# Altium footprint library FootPrintLib_8.PcbLib: 590 footprints (part 28 of 37)
Each footprint in its own frame and in the unit in brackets; x right, y up, seen from the top. Pads: shape width x height; smd on the part's side, far side on the other; paste and mask are expansions set on the pad; w line width, h text height; cw(c..) or ccw(c..) is an arc to the next point about the centre after c.
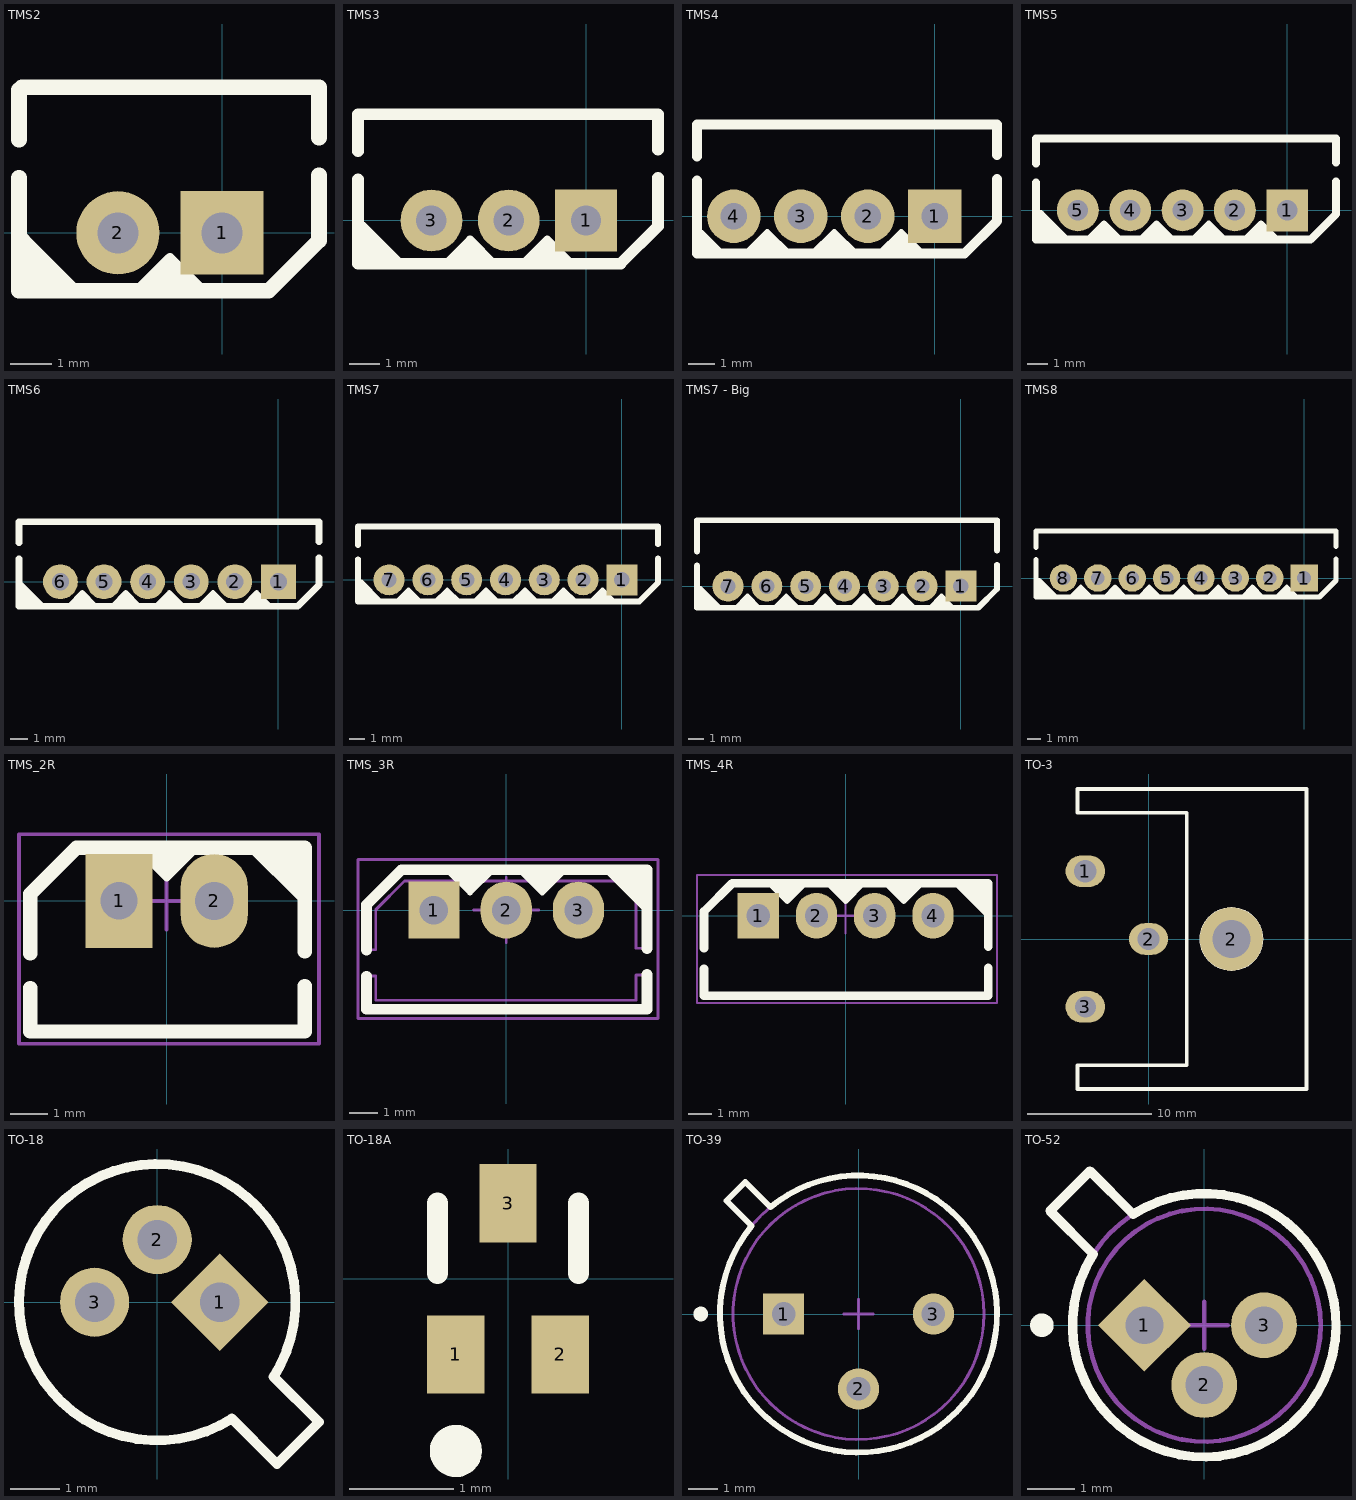
[diagram p27: the footprints below, top view; thin cyan lines are the x and y axes]

## TMS2 [mil]
pads (2):
  rect 80x80 hole 39.37: 1(0,0)
  round 80 hole 39.37: 2(-100,0)
Top Overlay:
  lines w10: -195,137.2 -192.2,140 ; -81.5,-55.71 -50,-24.21 ; -70.71,-55.71 -50,-35 -29.29,-55.71 ; -60.71,-55.71 -50,-45 -39.29,-55.71 ; -50,-55.71 -50,-24.21 ; -18.5,-55.71 -50,-24.21
  lines w15: -195,53.11 -195,-55.71 44.69,-55.71 93.11,-7.28 93.11,55.31 ; -195,89.33 -195,137.2 ; -192.2,140 93.11,140 93.11,91.54 ; -191.54,-7.28 -143.11,-55.71 ; -181.54,-55.71 -191.54,-45.71 -191.54,-35.71 -171.54,-55.71 -161.54,-55.71 -191.54,-25.71 -191.54,-15.71 -151.54,-55.71

## TMS3 [mil]
pads (3):
  rect 80x80 hole 39.37: 1(0,0)
  round 80 hole 39.37: 2(-100,0) 3(-200,0)
Top Overlay:
  lines w10: -181.5,-55.71 -150,-24.21 ; -170.71,-55.71 -150,-35 -129.29,-55.71 ; -160.71,-55.71 -150,-45 -139.29,-55.71 ; -150,-55.71 -150,-24.21 ; -118.5,-55.71 -150,-24.21 ; -81.5,-55.71 -50,-24.21 ; -70.71,-55.71 -50,-35 -29.29,-55.71 ; -60.71,-55.71 -50,-45 -39.29,-55.71 ; -50,-55.71 -50,-24.21 ; -18.5,-55.71 -50,-24.21
  lines w15: -295,53.11 -295,-55.71 44.69,-55.71 93.11,-7.28 93.11,55.31 ; -295,89.33 -295,137.2 93.11,137.2 93.11,91.54 ; -291.54,-7.28 -243.11,-55.71 ; -281.54,-55.71 -291.54,-45.71 -291.54,-35.71 -271.54,-55.71 -261.54,-55.71 -291.54,-25.71 -291.54,-15.71 -251.54,-55.71

## TMS4 [mil]
pads (4):
  rect 80x80 hole 39.37: 1(0,0)
  round 80 hole 39.37: 2(-100,0) 3(-200,0) 4(-300,0)
Top Overlay:
  lines w10: -350,-55.71 -350,-24.21 -318.5,-55.71 ; -350,-45 -339.29,-55.71 ; -350,-35 -329.29,-55.71 ; -281.5,-55.71 -250,-24.21 ; -270.71,-55.71 -250,-35 -229.29,-55.71 ; -260.71,-55.71 -250,-45 -239.29,-55.71 ; -250,-55.71 -250,-24.21 ; -218.5,-55.71 -250,-24.21 ; -181.5,-55.71 -150,-24.21 ; -170.71,-55.71 -150,-35 -129.29,-55.71 ; -160.71,-55.71 -150,-45 -139.29,-55.71 ; -150,-55.71 -150,-24.21 ; -118.5,-55.71 -150,-24.21 ; -81.5,-55.71 -50,-24.21 ; -70.71,-55.71 -50,-35 -29.29,-55.71 ; -60.71,-55.71 -50,-45 -39.29,-55.71 ; -50,-55.71 -50,-24.21 ; -18.5,-55.71 -50,-24.21
  lines w15: -355,53.11 -355,-55.71 44.69,-55.71 93.11,-7.28 93.11,55.31 ; -355,89.33 -355,137.2 93.11,137.2 93.11,91.54

## TMS5 [mil]
pads (5):
  rect 80x80 hole 39.37: 1(0,0)
  round 80 hole 39.37: 2(-100,0) 3(-200,0) 4(-300,0) 5(-400,0)
Top Overlay:
  lines w10: -470.71,-45 -460,-55.71 -469.29,-55.71 ; -456.63,-53.37 -452.66,-53.37 -455,-55.71 -440,-55.71 ; -381.5,-55.71 -350,-24.21 ; -370.71,-55.71 -350,-35 -329.29,-55.71 ; -360.71,-55.71 -350,-45 -339.29,-55.71 ; -350,-55.71 -350,-24.21 ; -318.5,-55.71 -350,-24.21 ; -281.5,-55.71 -250,-24.21 ; -270.71,-55.71 -250,-35 -229.29,-55.71 ; -260.71,-55.71 -250,-45 -239.29,-55.71 ; -250,-55.71 -250,-24.21 ; -218.5,-55.71 -250,-24.21 ; -181.5,-55.71 -150,-24.21 ; -170.71,-55.71 -150,-35 -129.29,-55.71 ; -160.71,-55.71 -150,-45 -139.29,-55.71 ; -150,-55.71 -150,-24.21 ; -118.5,-55.71 -150,-24.21 ; -81.5,-55.71 -50,-24.21 ; -70.71,-55.71 -50,-35 -29.29,-55.71 ; -60.71,-55.71 -50,-45 -39.29,-55.71 ; -50,-55.71 -50,-24.21 ; -18.5,-55.71 -50,-24.21
  lines w15: -480,53.11 -480,-55.71 44.69,-55.71 93.11,-7.28 93.11,55.31 ; -480,89.33 -480,137.2 93.11,137.2 93.11,91.54 ; -471.54,-7.28 -423.11,-55.71 ; -461.54,-55.71 -471.54,-45.71 -471.54,-35.71 -451.54,-55.71 -441.54,-55.71 -471.54,-25.71 -471.54,-15.71 -431.54,-55.71

## TMS6 [mil]
pads (6):
  rect 80x80 hole 39.37: 1(0,0)
  round 80 hole 39.37: 2(-100,0) 3(-200,0) 4(-300,0) 5(-400,0) 6(-500,0)
Top Overlay:
  lines w10: -481.5,-55.71 -450,-24.21 ; -470.71,-55.71 -450,-35 -429.29,-55.71 ; -460.71,-55.71 -450,-45 -439.29,-55.71 ; -450,-55.71 -450,-24.21 ; -418.5,-55.71 -450,-24.21 ; -381.5,-55.71 -350,-24.21 ; -370.71,-55.71 -350,-35 -329.29,-55.71 ; -360.71,-55.71 -350,-45 -339.29,-55.71 ; -350,-55.71 -350,-24.21 ; -318.5,-55.71 -350,-24.21 ; -281.5,-55.71 -250,-24.21 ; -270.71,-55.71 -250,-35 -229.29,-55.71 ; -260.71,-55.71 -250,-45 -239.29,-55.71 ; -250,-55.71 -250,-24.21 ; -218.5,-55.71 -250,-24.21 ; -181.5,-55.71 -150,-24.21 ; -170.71,-55.71 -150,-35 -129.29,-55.71 ; -160.71,-55.71 -150,-45 -139.29,-55.71 ; -150,-55.71 -150,-24.21 ; -118.5,-55.71 -150,-24.21 ; -81.5,-55.71 -50,-24.21 ; -70.71,-55.71 -50,-35 -29.29,-55.71 ; -60.71,-55.71 -50,-45 -39.29,-55.71 ; -50,-55.71 -50,-24.21 ; -18.5,-55.71 -50,-24.21
  lines w15: -595,53.11 -595,-55.71 44.69,-55.71 93.11,-7.28 93.11,55.31 ; -595,89.33 -595,137.2 93.11,137.2 93.11,91.54 ; -591.54,-7.28 -543.11,-55.71 ; -581.54,-55.71 -591.54,-45.71 -591.54,-35.71 -571.54,-55.71 -561.54,-55.71 -591.54,-25.71 -591.54,-15.71 -551.54,-55.71

## TMS7 [mil]
pads (7):
  rect 80x80 hole 39.37: 1(0,0)
  round 80 hole 39.37: 2(-100,0) 3(-200,0) 4(-300,0) 5(-400,0) 6(-500,0) 7(-600,0)
Top Overlay:
  lines w10: -581.5,-55.71 -550,-24.21 ; -570.71,-55.71 -550,-35 -529.29,-55.71 ; -560.71,-55.71 -550,-45 -539.29,-55.71 ; -550,-55.71 -550,-24.21 ; -518.5,-55.71 -550,-24.21 ; -481.5,-55.71 -450,-24.21 ; -470.71,-55.71 -450,-35 -429.29,-55.71 ; -460.71,-55.71 -450,-45 -439.29,-55.71 ; -450,-55.71 -450,-24.21 ; -418.5,-55.71 -450,-24.21 ; -381.5,-55.71 -350,-24.21 ; -370.71,-55.71 -350,-35 -329.29,-55.71 ; -360.71,-55.71 -350,-45 -339.29,-55.71 ; -350,-55.71 -350,-24.21 ; -318.5,-55.71 -350,-24.21 ; -281.5,-55.71 -250,-24.21 ; -270.71,-55.71 -250,-35 -229.29,-55.71 ; -260.71,-55.71 -250,-45 -239.29,-55.71 ; -250,-55.71 -250,-24.21 ; -218.5,-55.71 -250,-24.21 ; -181.5,-55.71 -150,-24.21 ; -170.71,-55.71 -150,-35 -129.29,-55.71 ; -160.71,-55.71 -150,-45 -139.29,-55.71 ; -150,-55.71 -150,-24.21 ; -118.5,-55.71 -150,-24.21 ; -81.5,-55.71 -50,-24.21 ; -70.71,-55.71 -50,-35 -29.29,-55.71 ; -60.71,-55.71 -50,-45 -39.29,-55.71 ; -50,-55.71 -50,-24.21 ; -18.5,-55.71 -50,-24.21
  lines w15: -680,53.11 -680,-55.71 44.69,-55.71 93.11,-7.28 93.11,55.31 ; -680,89.33 -680,137.2 93.11,137.2 93.11,91.54 ; -671.54,-7.28 -623.11,-55.71 ; -661.54,-55.71 -671.54,-45.71 -671.54,-35.71 -651.54,-55.71 -641.54,-55.71 -671.54,-25.71 -671.54,-15.71 -631.54,-55.71

## TMS7 - Big [mil] "p?"
pads (7):
  rect 80x80 hole 39.37: 1(0,0)
  round 80 hole 39.37: 2(-100,0) 3(-200,0) 4(-300,0) 5(-400,0) 6(-500,0) 7(-600,0)
Top Overlay:
  lines w10: -581.5,-55.71 -550,-24.21 ; -570.71,-55.71 -550,-35 -529.29,-55.71 ; -560.71,-55.71 -550,-45 -539.29,-55.71 ; -550,-55.71 -550,-24.21 ; -518.5,-55.71 -550,-24.21 ; -481.5,-55.71 -450,-24.21 ; -470.71,-55.71 -450,-35 -429.29,-55.71 ; -460.71,-55.71 -450,-45 -439.29,-55.71 ; -450,-55.71 -450,-24.21 ; -418.5,-55.71 -450,-24.21 ; -381.5,-55.71 -350,-24.21 ; -370.71,-55.71 -350,-35 -329.29,-55.71 ; -360.71,-55.71 -350,-45 -339.29,-55.71 ; -350,-55.71 -350,-24.21 ; -318.5,-55.71 -350,-24.21 ; -281.5,-55.71 -250,-24.21 ; -270.71,-55.71 -250,-35 -229.29,-55.71 ; -260.71,-55.71 -250,-45 -239.29,-55.71 ; -250,-55.71 -250,-24.21 ; -218.5,-55.71 -250,-24.21 ; -181.5,-55.71 -150,-24.21 ; -170.71,-55.71 -150,-35 -129.29,-55.71 ; -160.71,-55.71 -150,-45 -139.29,-55.71 ; -150,-55.71 -150,-24.21 ; -118.5,-55.71 -150,-24.21 ; -81.5,-55.71 -50,-24.21 ; -70.71,-55.71 -50,-35 -29.29,-55.71 ; -60.71,-55.71 -50,-45 -39.29,-55.71 ; -50,-55.71 -50,-24.21 ; -18.5,-55.71 -50,-24.21
  lines w15: -680,53.11 -680,-55.71 44.69,-55.71 93.11,-7.28 93.11,55.31 ; -680,89.33 -680,170 93.11,170 93.11,91.54 ; -671.54,-7.28 -623.11,-55.71 ; -661.54,-55.71 -671.54,-45.71 -671.54,-35.71 -651.54,-55.71 -641.54,-55.71 -671.54,-25.71 -671.54,-15.71 -631.54,-55.71

## TMS8 [mil]
pads (8):
  rect 80x80 hole 39.37: 1(0,0)
  round 80 hole 39.37: 2(-100,0) 3(-200,0) 4(-300,0) 5(-400,0) 6(-500,0) 7(-600,0) 8(-700,0)
Top Overlay:
  lines w10: -681.5,-55.71 -650,-24.21 ; -670.71,-55.71 -650,-35 -629.29,-55.71 ; -660.71,-55.71 -650,-45 -639.29,-55.71 ; -650,-55.71 -650,-24.21 ; -618.5,-55.71 -650,-24.21 ; -581.5,-55.71 -550,-24.21 ; -570.71,-55.71 -550,-35 -529.29,-55.71 ; -560.71,-55.71 -550,-45 -539.29,-55.71 ; -550,-55.71 -550,-24.21 ; -518.5,-55.71 -550,-24.21 ; -481.5,-55.71 -450,-24.21 ; -470.71,-55.71 -450,-35 -429.29,-55.71 ; -460.71,-55.71 -450,-45 -439.29,-55.71 ; -450,-55.71 -450,-24.21 ; -418.5,-55.71 -450,-24.21 ; -381.5,-55.71 -350,-24.21 ; -370.71,-55.71 -350,-35 -329.29,-55.71 ; -360.71,-55.71 -350,-45 -339.29,-55.71 ; -350,-55.71 -350,-24.21 ; -318.5,-55.71 -350,-24.21 ; -281.5,-55.71 -250,-24.21 ; -270.71,-55.71 -250,-35 -229.29,-55.71 ; -260.71,-55.71 -250,-45 -239.29,-55.71 ; -250,-55.71 -250,-24.21 ; -218.5,-55.71 -250,-24.21 ; -181.5,-55.71 -150,-24.21 ; -170.71,-55.71 -150,-35 -129.29,-55.71 ; -160.71,-55.71 -150,-45 -139.29,-55.71 ; -150,-55.71 -150,-24.21 ; -118.5,-55.71 -150,-24.21 ; -81.5,-55.71 -50,-24.21 ; -70.71,-55.71 -50,-35 -29.29,-55.71 ; -60.71,-55.71 -50,-45 -39.29,-55.71 ; -50,-55.71 -50,-24.21 ; -18.5,-55.71 -50,-24.21
  lines w15: -780,53.11 -780,-55.71 44.69,-55.71 93.11,-7.28 93.11,55.31 ; -780,89.33 -780,137.2 93.11,137.2 93.11,91.54 ; -771.54,-7.28 -723.11,-55.71 ; -761.54,-55.71 -771.54,-45.71 -771.54,-35.71 -751.54,-55.71 -741.54,-55.71 -771.54,-25.71 -771.54,-15.71 -731.54,-55.71

## TMS_2R [mm] "Connector; TMS Sereis; 2 Position ,2.54mm Pitch"
height 5.9
pads (2):
  rect 1.8x2.5 hole 1: 1(-1.27,0)
  oval 1.8x2.5 hole 1.016: 2(1.27,0)
Top Overlay:
  lines w0.203: -0.8,1.415 0,0.615 ; -0.526,1.415 0,0.889 0.526,1.415 ; -0.272,1.415 0,1.143 0.272,1.415 ; 0,1.415 0,0.615 ; 0.8,1.415 0,0.615
  lines w0.381: -3.635,-2.325 -3.635,-3.485 3.683,-3.485 3.683,-2.269 ; -3.635,-1.405 -3.635,0.185 -2.405,1.415 3.683,1.415 3.683,-1.349 ; 2.365,1.415 3.595,0.185 ; 2.579,1.415 3.595,0.399 3.595,0.653 2.833,1.415 3.087,1.415 3.595,0.907 3.595,1.161 3.341,1.415
Mechanical 15:
  lines w0.1: -0.762,0 0,0 ; 0,-0.762 0,0 ; 0,0.762 0,0 ; 0.762,0 0,0 ; -3.937,-3.81 -3.937,1.778 4.064,1.778 4.064,-3.81 -3.937,-3.81
3D body: height 4.5, standoff -2, extent 0.92,-0.35 1.62,0.35
3D body: height 4.5, standoff -2, extent -1.62,-0.35 -0.92,0.35
3D body: height 6, standoff 0, extent -3.85,-3.6 3.9,-2.25
3D body: height 2, standoff 0, extent -3.65,-3.25 3.67,1.3
3D body: height 6, standoff 0, extent -3.85,-1 3.87,1.5

## TMS_3R [mm] "Connector; TMS Sereis; 3 Position ,2.54mm Pitch"
height 5.9
pads (3):
  rect 1.8x2 hole 1: 1(-2.54,0)
  oval 1.8x2 hole 1: 2(0,0) 3(2.54,0)
Top Overlay:
  lines w0.203: -2.07,1.415 -1.27,0.615 ; -1.796,1.415 -1.27,0.889 -0.744,1.415 ; -1.542,1.415 -1.27,1.143 -0.998,1.415 ; -1.27,1.415 -1.27,0.615 ; -0.47,1.415 -1.27,0.615 ; 0.47,1.415 1.27,0.615 ; 0.744,1.415 1.27,0.889 1.796,1.415 ; 0.998,1.415 1.27,1.143 1.542,1.415 ; 1.27,1.415 1.27,0.615 ; 2.07,1.415 1.27,0.615
  lines w0.381: -4.905,-2.325 -4.905,-3.485 4.953,-3.485 4.953,-2.269 ; -4.905,-1.405 -4.905,0.185 -3.675,1.415 4.953,1.415 4.953,-1.349 ; 3.635,1.415 4.865,0.185 ; 3.849,1.415 4.865,0.399 4.865,0.653 4.103,1.415 4.357,1.415 4.865,0.907 4.865,1.161 4.611,1.415
Mechanical 13:
  circle w0.1: c-2.552,0.009 r0.387
  circle w0.1: c-0.012,0.009 r0.387
  circle w0.1: c2.528,0.009 r0.387
  lines w0.1: -4.917,-3.476 -4.917,-2.316 -4.584,-2.316 -4.584,-3.166 4.56,-3.166 4.56,-2.277 4.941,-2.277 4.941,-3.476 -4.917,-3.476 ; -4.917,-1.396 -4.592,-1.396 -4.584,-1.388 -4.584,0.009 -3.568,1.025 -1.683,1.025 -1.282,0.624 -0.881,1.025 0.857,1.025 1.258,0.624 1.659,1.025 4.019,1.025 4.56,0.484 4.56,-1.34 4.941,-1.34 4.941,1.424 -3.687,1.424 -4.917,0.194 -4.917,-1.396
Mechanical 15:
  lines w0.1: -1.143,0 0,0 ; 0,-1.143 0,0 ; 0,1.143 0,0 ; 1.143,0 0,0 ; -5.207,-3.81 -5.207,1.778 5.334,1.778 5.334,-3.81 -5.207,-3.81
3D body: height 5.8, standoff -2, extent -2.946,-0.385 -2.158,0.403
3D body: height 5.8, standoff -2, extent -0.406,-0.385 0.382,0.403
3D body: height 5.8, standoff -2, extent 2.134,-0.385 2.922,0.403
3D body: height 1.8, standoff 0, extent -4.585,-3.166 4.561,1.025
3D body: height 5.9, standoff 0, extent -4.918,-1.397 4.942,1.425
3D body: height 5.9, standoff 0.9, extent -4.916,-3.475 4.94,-2.278

## TMS_4R [mm] "Connector; TMS Sereis; 4 Position ,2.54mm Pitch"
height 5.9
pads (4):
  rect 1.8x2 hole 1.016: 1(-3.81,0)
  oval 1.8x2 hole 1.016: 2(-1.27,0) 3(1.27,0) 4(3.81,0)
Top Overlay:
  lines w0.203: -3.34,1.415 -2.54,0.615 ; -3.066,1.415 -2.54,0.889 -2.014,1.415 ; -2.812,1.415 -2.54,1.143 -2.268,1.415 ; -2.54,1.415 -2.54,0.615 ; -1.74,1.415 -2.54,0.615 ; -0.8,1.415 0,0.615 ; -0.526,1.415 0,0.889 0.526,1.415 ; -0.272,1.415 0,1.143 0.272,1.415 ; 0,1.415 0,0.615 ; 0.8,1.415 0,0.615 ; 1.74,1.415 2.54,0.615 ; 2.014,1.415 2.54,0.889 3.066,1.415 ; 2.268,1.415 2.54,1.143 2.812,1.415 ; 2.54,1.415 2.54,0.615 ; 3.34,1.415 2.54,0.615
  lines w0.381: -6.175,-2.325 -6.175,-3.485 6.223,-3.485 6.223,-2.269 ; -6.175,-1.405 -6.175,0.185 -4.945,1.415 6.223,1.415 6.223,-1.349 ; 4.905,1.415 6.135,0.185 ; 5.119,1.415 6.135,0.399 6.135,0.653 5.373,1.415 5.627,1.415 6.135,0.907 6.135,1.161 5.881,1.415
Mechanical 15:
  lines w0.1: -0.762,0 0,0 ; 0,-0.762 0,0 ; 0,0.762 0,0 ; 0.762,0 0,0 ; -6.477,-3.81 6.604,-3.81 6.604,1.778 -6.477,1.778 -6.477,-3.81
3D body: height 4.5, standoff -2, extent 3.46,-0.35 4.16,0.35
3D body: height 4.5, standoff -2, extent 0.92,-0.35 1.62,0.35
3D body: height 4.5, standoff -2, extent -1.62,-0.35 -0.92,0.35
3D body: height 4.5, standoff -2, extent -4.16,-0.35 -3.46,0.35
3D body: height 6, standoff 0, extent -6.3,-3.6 6.35,-2.25
3D body: height 2, standoff 0, extent -6.1,-3.25 6.2,1.35
3D body: height 6, standoff 0, extent -6.3,-1 6.35,1.5

## TO-3 [mil]
pads (4):
  oval 125x100 hole 70.87: 1(-200,215) 2(0,0)
  round 200 hole 120: 2(262.5,0)
  oval 125x100 hole 66.93: 3(-200,-215)
Top Overlay:
  circle w12: c262.5,0 r95
  lines w12: -225,-475 -225,-400 121,-400 121,400 -225,400 -225,475 500,475 500,-475 -225,-475

## TO-18 [mm] "Can; 3 Leads; Pin Circle Dia. 2.54 mm; Lead Dia. 0.48 mm (max)"
height 2.67
pads (3):
  rect 1.4x1.4 hole 0.8 rot 45: 1(1.27,0)
  round 1.4 hole 0.8: 2(0,1.27) 3(-1.27,0)
Top Overlay:
  lines w0.2: 1.51,-2.358 cw(c0,0) 2.358,-1.51 3.277,-2.429 2.429,-3.277 1.51,-2.358

## TO-18A [mm] "SC-89; 3 Flat Leads; Body 1.6 x 1.6 x 0.7 mm, inc leads (LxWxH typ)"
height 0.8
pads (3):
  rect 0.55x0.75 smd: 1(-0.5,-0.725) 2(0.5,-0.725) 3(0,0.725)
Top Overlay:
  circle w0.25: c-0.5,-1.65 r0.125
  lines w0.2: -0.676,0.05 -0.676,0.725 ; 0.675,0.05 0.675,0.725

## TO-39 [mm] "Can; 3 Leads; Pin Circle Dia. 5.08 mm; Lead Dia. 0.48 mm (max)"
height 4.55
pads (3):
  rect 1.4x1.4 hole 0.8: 1(-2.54,0)
  round 1.4 hole 0.8: 2(0,-2.54) 3(2.54,0)
Top Overlay:
  circle w0.25: c-5.35,0 r0.125
  lines w0.2: -3.626,2.99 -4.475,3.838 -3.838,4.475 -2.99,3.626 ; -3.622,2.987 ccw(c0,0) -2.987,3.622
Mechanical 13:
  circle w0.1: c0,0 r4.695
  circle w0.1: c0,0 r4.255
Mechanical 15:
  lines w0.1: -0.5,0 0.5,0 ; 0,-0.5 0,0.5
3D body: height 1.27, standoff 0, extent -4.694,-4.694 4.694,4.694
3D body: height 4.55, standoff 1.27, extent -4.254,-4.254 4.254,4.254

## TO-52 [mm] "Can; 3 Leads; Pin Circle Dia. 2.54 mm; Lead Dia. 0.48 mm (max)"
height 2.67
pads (3):
  rect 1.4x1.4 hole 0.8 rot 45: 1(-1.27,0)
  round 1.4 hole 0.8: 2(0,-1.27) 3(1.27,0)
Top Overlay:
  circle w0.25: c-3.45,0 r0.125
  lines w0.2: -3.277,2.429 -2.429,3.277 -1.51,2.358 cw(c0,0) -2.358,1.51 -3.277,2.429
Mechanical 13:
  circle w0.1: c0,0 r2.475
  circle w0.1: c0,0 r2.8
Mechanical 15:
  lines w0.1: -0.5,0 0.5,0 ; 0,-0.5 0,0.5
3D body: height 2.67, standoff 0.76, extent -2.474,-2.474 2.474,2.474
3D body: height 0.76, standoff 0, extent -2.799,-2.799 2.799,2.799